# Altium footprint library LMG2100R044RARR.PcbLib: 1 footprints
Each footprint in its own frame and in the unit in brackets; x right, y up, seen from the top. Pads: shape width x height; smd on the part's side, far side on the other; paste and mask are expansions set on the pad; w line width, h text height; cw(c..) or ccw(c..) is an arc to the next point about the centre after c.
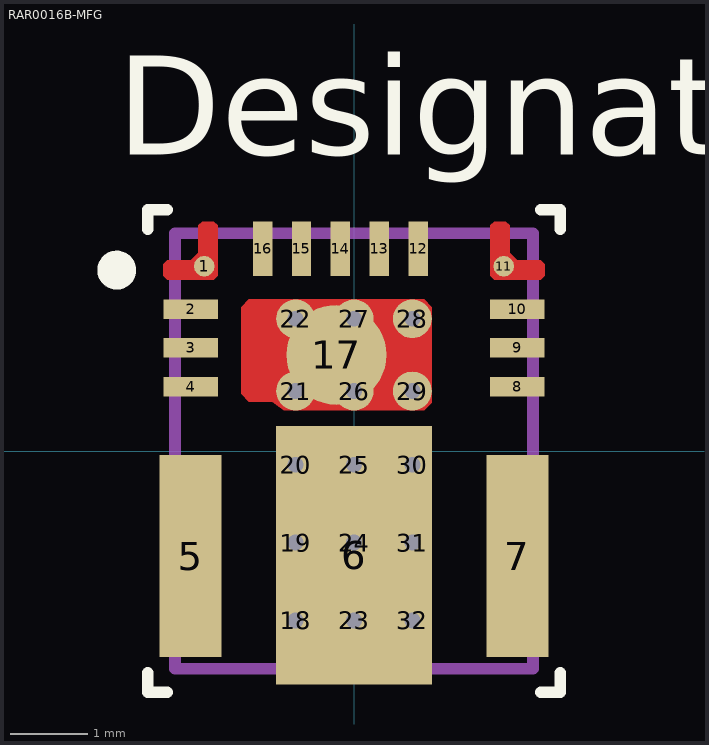
[diagram p0: the footprint, top view; thin cyan lines are the x and y axes]

## RAR0016B-MFG [mm]
pads (32):
  round 0.265 smd paste+0 mask-0.114: 1(-1.925,2.375) 11(1.925,2.375)
  rect 0.7x0.25 smd paste+0 mask-0.343: 2(-2.1,1.825) 3(-2.1,1.325) 4(-2.1,0.825) 8(2.1,0.825) 9(2.1,1.325) 10(2.1,1.825)
  rect 0.8x2.6 smd paste-1.287 mask-1.283: 5(-2.1,-1.35) 7(2.1,-1.35)
  rect 2x3.321 smd paste-1.648 mask-1.651: 6(0,-1.339)
  rect 0.25x0.7 smd paste+0 mask-0.343: 12(0.825,2.6) 13(0.325,2.6) 14(-0.175,2.6) 15(-0.675,2.6) 16(-1.175,2.6)
  round 1.286 smd paste-0.63 mask-0.635: 17(-0.225,1.235)
  round 0.5 hole 0.203 paste-0.25 mask-0.241: 18(-0.75,-2.177) 19(-0.75,-1.177) 20(-0.75,-0.177) 21(-0.75,0.771) 22(-0.75,1.7) 23(0,-2.177) 24(0,-1.177) 25(0,-0.177) 26(0,0.771) 27(0,1.7) 28(0.75,1.7) 29(0.75,0.771) 30(0.75,-0.177) 31(0.75,-1.177) 32(0.75,-2.177)
Top Layer:
  region: 1.8,2.2 2.4,2.2 2.45,2.25 2.45,2.4 2.4,2.45 2.1,2.45 2,2.55 2,2.9 1.95,2.95 1.8,2.95 1.75,2.9 1.75,2.25
  region: -1.8,2.2 -2.4,2.2 -2.45,2.25 -2.45,2.4 -2.4,2.45 -2.1,2.45 -2,2.55 -2,2.9 -1.95,2.95 -1.8,2.95 -1.75,2.9 -1.75,2.25
  region: -1.45,0.735 -1.45,1.85 -1.35,1.95 0.9,1.95 1,1.85 1,0.621 0.9,0.521 -0.904,0.521 -1.001,0.597 -1.05,0.635 -1.35,0.635
Top Overlay:
  circle w0.25: c-3.05,2.325 r0.125
  lines w0.15: -2.65,-2.85 -2.65,-3.1 -2.4,-3.1 ; -2.65,2.85 -2.65,3.1 -2.4,3.1 ; 2.4,-3.1 2.65,-3.1 2.65,-2.85 ; 2.4,3.1 2.65,3.1 2.65,2.85
  text "Designator239" at -3.048,3.81 h1.27
  text ".Designator" at -3.492,-0.635 h1.27
Top Paste:
  drawing of 9 lines, arcs and shapes, not listed
Top Solder:
  drawing of 17 lines, arcs and shapes, not listed
Mechanical 13:
  lines w0.15: -2.3,-2.8 -2.3,2.8 2.3,2.8 2.3,-2.8 -2.3,-2.8
  text ".Designator" at -3.492,-0.635 h1.27